# Altium footprint library Crabit.PcbLib: 17 footprints (part 2 of 2)
Each footprint in its own frame and in the unit in brackets; x right, y up, seen from the top. Pads: shape width x height; smd on the part's side, far side on the other; paste and mask are expansions set on the pad; w line width, h text height; cw(c..) or ccw(c..) is an arc to the next point about the centre after c.
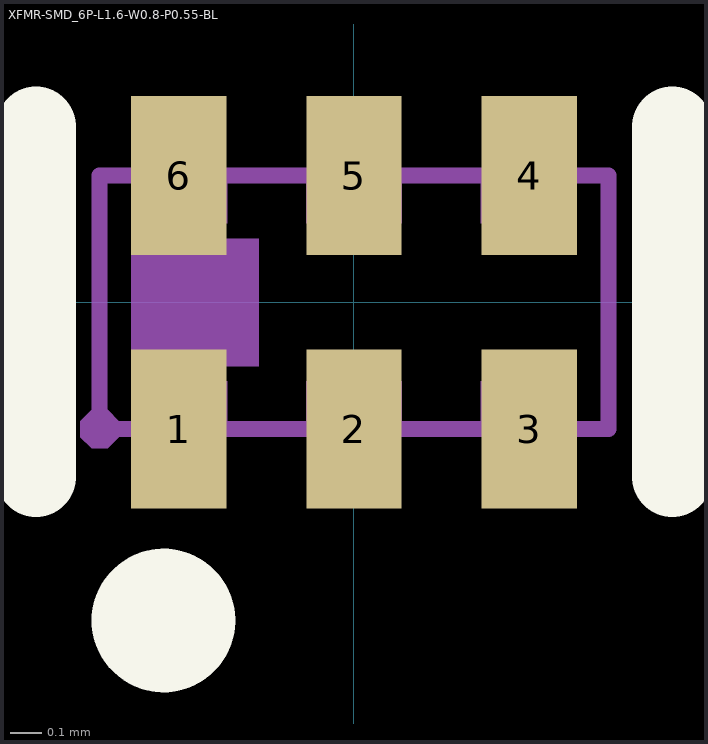
[diagram p1: the footprint, top view; thin cyan lines are the x and y axes]

## XFMR-SMD_6P-L1.6-W0.8-P0.55-BL [mm]
pads (6):
  rect 0.3x0.5 smd: 1(-0.551,-0.399) 2(0,-0.399) 3(0.551,-0.399) 4(0.551,0.399) 5(0,0.399) 6(-0.551,0.399)
Top Overlay:
  circle w0.254: c-0.599,-1.001 r0.099
  lines w0.254: -1.001,-0.549 -1.001,0.551 ; 1.001,-0.549 1.001,0.551
Mechanical 16:
  circle w0.201: c-0.599,-1.001 r0.099
  region: -0.701,-0.249 -0.399,-0.249 -0.399,-0.399 -0.701,-0.399
  region: -0.15,-0.249 0.15,-0.249 0.15,-0.399 -0.15,-0.399
  region: 0.399,-0.249 0.701,-0.249 0.701,-0.399 0.399,-0.399
  region: 0.399,0.399 0.701,0.399 0.701,0.249 0.399,0.249
  region: -0.15,0.399 0.15,0.399 0.15,0.249 -0.15,0.249
  region: -0.701,0.399 -0.399,0.399 -0.399,0.249 -0.701,0.249
  region: -0.701,-0.201 -0.3,-0.201 -0.3,0.201 -0.701,0.201
  region: -0.861,-0.399 -0.861,-0.374 -0.825,-0.338 -0.775,-0.338 -0.739,-0.374 -0.739,-0.399 -0.739,-0.424 -0.775,-0.46 -0.825,-0.46 -0.861,-0.424 -0.861,-0.399
  lines w0.051: -0.8,-0.399 0.8,-0.399 0.8,0.399 -0.8,0.399 -0.8,-0.399
3D body "npth.STEP": height 0.6, standoff 0, extent -0.8,-0.399 0.8,0.401